# Altium footprint library SOIC-16_3.9x9.9mm_P1.27mm.PcbLib: 1 footprints
Each footprint in its own frame and in the unit in brackets; x right, y up, seen from the top. Pads: shape width x height; smd on the part's side, far side on the other; paste and mask are expansions set on the pad; w line width, h text height; cw(c..) or ccw(c..) is an arc to the next point about the centre after c.
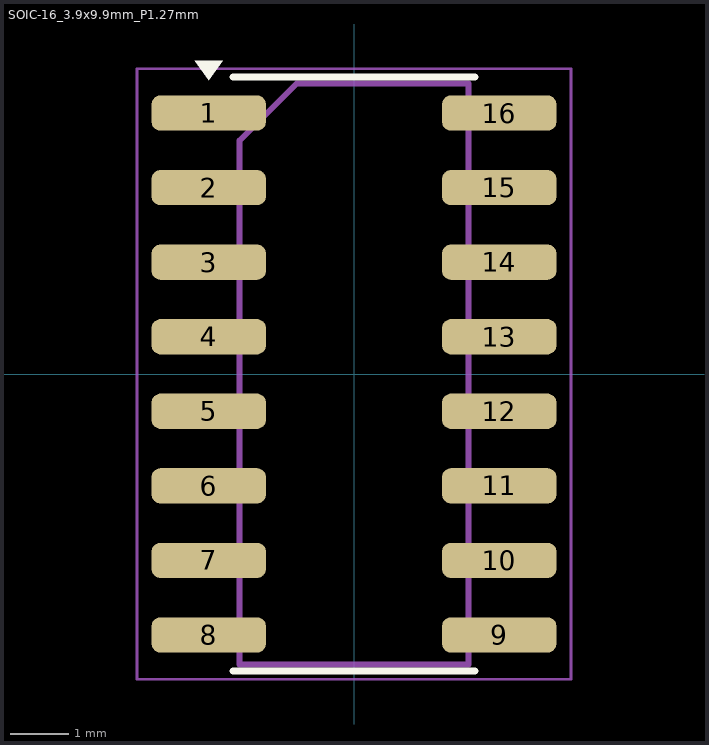
[diagram p0: the footprint, top view; thin cyan lines are the x and y axes]

## SOIC-16_3.9x9.9mm_P1.27mm [mm] "SOIC-16 150 mil, JEDEC MS-012AC (e.g. CH340C SOP-16); IPC-7351B gullwing density B; generated by ecadlib"
height 1.75
pads (16):
  rrect50% 1.95x0.6 smd: 1(-2.475,4.445) 2(-2.475,3.175) 3(-2.475,1.905) 4(-2.475,0.635) 5(-2.475,-0.635) 6(-2.475,-1.905) 7(-2.475,-3.175) 8(-2.475,-4.445) 9(2.475,-4.445) 10(2.475,-3.175) 11(2.475,-1.905) 12(2.475,-0.635) 13(2.475,0.635) 14(2.475,1.905) 15(2.475,3.175) 16(2.475,4.445)
Top Overlay:
  region: -2.475,5.005 -2.715,5.335 -2.235,5.335
  lines w0.12: -2.06,-5.06 2.06,-5.06 ; -2.06,5.06 2.06,5.06
  text ".Designator" at -1.391,5.4 h1
Mechanical 13:
  lines w0.1: -1.95,-4.95 1.95,-4.95 1.95,4.95 -0.975,4.95 -1.95,3.975 -1.95,-4.95
  text ".Comment" at -3.708,-6.4 h1
Mechanical 15:
  lines w0.05: -3.7,-5.2 3.7,-5.2 3.7,5.2 -3.7,5.2 -3.7,-5.2